# Altium footprint library Switches.PcbLib: 69 footprints (part 3 of 5)
Each footprint in its own frame and in the unit in brackets; x right, y up, seen from the top. Pads: shape width x height; smd on the part's side, far side on the other; paste and mask are expansions set on the pad; w line width, h text height; cw(c..) or ccw(c..) is an arc to the next point about the centre after c.
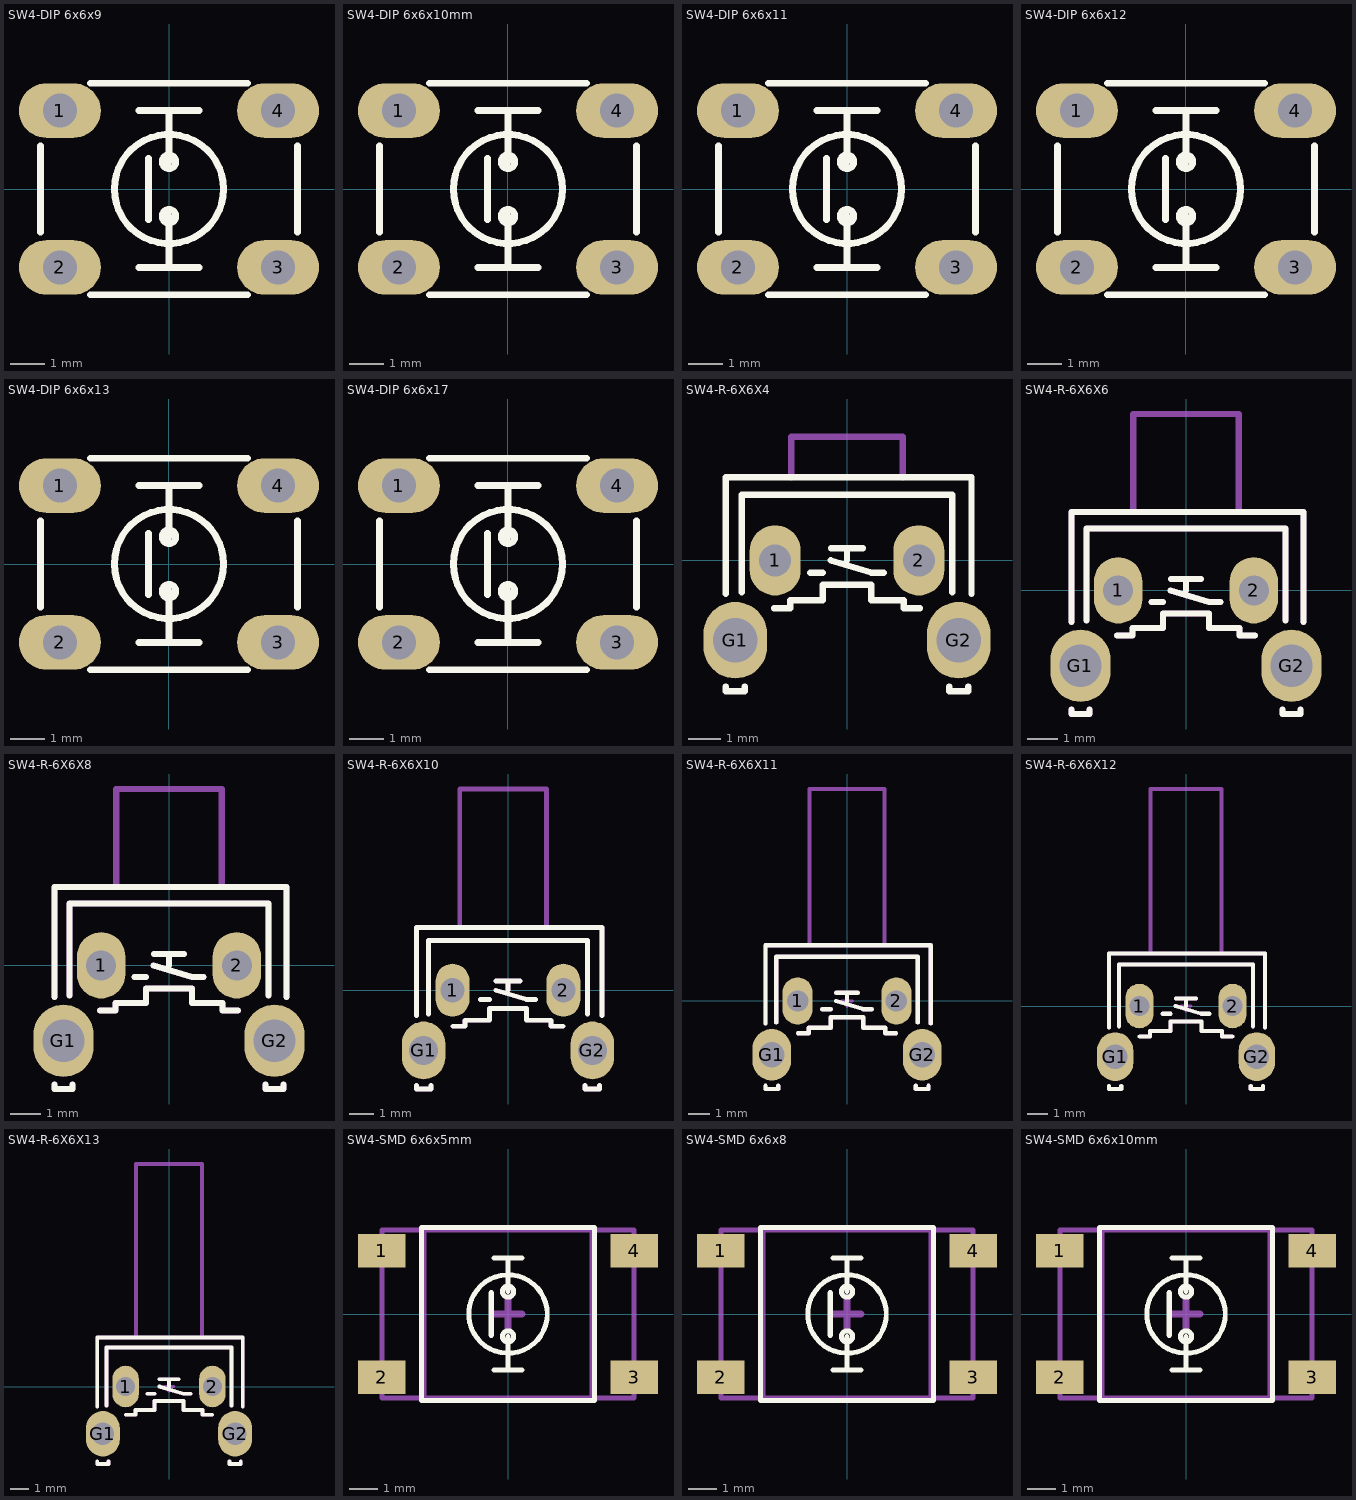
[diagram p2: the footprints below, top view; thin cyan lines are the x and y axes]

## SW4-DIP 6x6x9 [mm] "SW button 4pin, 250 x250 mil"
pads (4):
  oval 2.4x1.6 hole 1 mask+0.1: 1(-3.2,2.3) 2(-3.2,-2.3) 3(3.2,-2.3) 4(3.2,2.3)
Top Overlay:
  circle w0.2: c0,0 r1.6
  circle w0.2: c0,0.8 r0.2
  circle w0.2: c0,-0.8 r0.2
  lines w0.2: -3.772,-1.27 -3.772,1.27 ; -2.3,-3.1 2.3,-3.1 ; -2.3,3.1 2.3,3.1 ; -0.889,-2.3 0.889,-2.3 ; -0.889,2.3 0.889,2.3 ; -0.6,-0.9 -0.6,0.9 ; 0,-2.3 0,-0.8 ; 0,0.8 0,2.3 ; 3.771,-1.27 3.771,1.27
Top Designator:
  text ".Designator" at -3.71,-0.344 h1.52
3D body "button_hole_6x6x9.5.stp": height 9.6, standoff -3.4, extent -3.863,-3 3.863,3

## SW4-DIP 6x6x10mm [mm] "SW button 4pin, 250 x250 mil"
height 2.54
pads (4):
  oval 2.4x1.6 hole 1 mask+0.1: 1(-3.2,2.3) 2(-3.2,-2.3) 3(3.2,-2.3) 4(3.2,2.3)
Top Overlay:
  circle w0.2: c0,0 r1.6
  circle w0.2: c0,0.8 r0.2
  circle w0.2: c0,-0.8 r0.2
  lines w0.2: -3.772,-1.27 -3.772,1.27 ; -2.3,-3.1 2.3,-3.1 ; -2.3,3.1 2.3,3.1 ; -0.889,-2.3 0.889,-2.3 ; -0.889,2.3 0.889,2.3 ; -0.6,-0.9 -0.6,0.9 ; 0,-2.3 0,-0.8 ; 0,0.8 0,2.3 ; 3.771,-1.27 3.771,1.27
Top Designator:
  text ".Designator" at -3.71,-0.344 h1.52
3D body "SW3dPS-Panasonic-EVQPA-Pushbutton.STEP": height 9.5, standoff -3.5, extent -4.106,-3 4.106,3

## SW4-DIP 6x6x11 [mm] "SW button 4pin, 250 x250 mil"
pads (4):
  oval 2.4x1.6 hole 1 mask+0.1: 1(-3.2,2.3) 2(-3.2,-2.3) 3(3.2,-2.3) 4(3.2,2.3)
Top Overlay:
  circle w0.2: c0,0 r1.6
  circle w0.2: c0,0.8 r0.2
  circle w0.2: c0,-0.8 r0.2
  lines w0.2: -3.772,-1.27 -3.772,1.27 ; -2.3,-3.1 2.3,-3.1 ; -2.3,3.1 2.3,3.1 ; -0.889,-2.3 0.889,-2.3 ; -0.889,2.3 0.889,2.3 ; -0.6,-0.9 -0.6,0.9 ; 0,-2.3 0,-0.8 ; 0,0.8 0,2.3 ; 3.771,-1.27 3.771,1.27
Top Designator:
  text ".Designator" at -3.71,-0.344 h1.52
3D body "TS6-THT_H-11.0.step": height 11, standoff -3.5, extent -3.949,-3 3.949,3

## SW4-DIP 6x6x12 [mm] "SW button 4pin, 250 x250 mil"
height 2.54
pads (4):
  oval 2.4x1.6 hole 1 mask+0.1: 1(-3.2,2.3) 2(-3.2,-2.3) 3(3.2,-2.3) 4(3.2,2.3)
Top Overlay:
  circle w0.2: c0,0 r1.6
  circle w0.2: c0,0.8 r0.2
  circle w0.2: c0,-0.8 r0.2
  lines w0.2: -3.772,-1.27 -3.772,1.27 ; -2.3,-3.1 2.3,-3.1 ; -2.3,3.1 2.3,3.1 ; -0.889,-2.3 0.889,-2.3 ; -0.889,2.3 0.889,2.3 ; -0.6,-0.9 -0.6,0.9 ; 0,-2.3 0,-0.8 ; 0,0.8 0,2.3 ; 3.771,-1.27 3.771,1.27
Top Designator:
  text ".Designator" at -3.71,-0.344 h1.52
3D body "SW3dPS-Panasonic-EVQPA-Pushbutton.STEP": height 9.5, standoff -3.5, extent -4.106,-3 4.106,3
3D body: height 12, standoff 0.51, extent -1.6,-1.6 1.6,1.6

## SW4-DIP 6x6x13 [mm] "SW button 4pin, 250 x250 mil"
height 2.54
pads (4):
  oval 2.4x1.6 hole 1 mask+0.1: 1(-3.2,2.3) 2(-3.2,-2.3) 3(3.2,-2.3) 4(3.2,2.3)
Top Overlay:
  circle w0.2: c0,0 r1.6
  circle w0.2: c0,0.8 r0.2
  circle w0.2: c0,-0.8 r0.2
  lines w0.2: -3.772,-1.27 -3.772,1.27 ; -2.3,-3.1 2.3,-3.1 ; -2.3,3.1 2.3,3.1 ; -0.889,-2.3 0.889,-2.3 ; -0.889,2.3 0.889,2.3 ; -0.6,-0.9 -0.6,0.9 ; 0,-2.3 0,-0.8 ; 0,0.8 0,2.3 ; 3.771,-1.27 3.771,1.27
Top Designator:
  text ".Designator" at -3.71,-0.344 h1.52
3D body "TS6-THT_H-13.0.step": height 13, standoff -3.5, extent -3.949,-3 3.949,3

## SW4-DIP 6x6x17 [mm] "SW button 4pin, 250 x250 mil"
height 2.54
pads (4):
  oval 2.4x1.6 hole 1 mask+0.1: 1(-3.2,2.3) 2(-3.2,-2.3) 3(3.2,-2.3) 4(3.2,2.3)
Top Overlay:
  circle w0.2: c0,0 r1.6
  circle w0.2: c0,0.8 r0.2
  circle w0.2: c0,-0.8 r0.2
  lines w0.2: -3.772,-1.27 -3.772,1.27 ; -2.3,-3.1 2.3,-3.1 ; -2.3,3.1 2.3,3.1 ; -0.889,-2.3 0.889,-2.3 ; -0.889,2.3 0.889,2.3 ; -0.6,-0.9 -0.6,0.9 ; 0,-2.3 0,-0.8 ; 0,0.8 0,2.3 ; 3.771,-1.27 3.771,1.27
Top Designator:
  text ".Designator" at -3.71,-0.344 h1.52
3D body "button_hole_6x6x17.0.stp": height 17, standoff -3.5, extent -3.863,-3 3.863,3

## SW4-R-6X6X4 [mm] "SWITCH, PUSHBUTTON, THD, SPST, 6X6X3.85 mm; 1,000,000 cycles ; 0.98N Force, SKHHLMA010"
height 7.4
pads (4):
  oval 1.6x2.2 hole 1 mask+0.1: 1(-2.25,0) 2(2.25,0)
  oval 2x2.4 hole 1.4 mask+0.1: G1(-3.5,-2.5) G2(3.5,-2.5)
Top Overlay:
  lines w0.2: -3.8,-3.95 -3.8,-4.1 -3.2,-4.1 -3.2,-3.95 ; -3.8,-1.05 -3.8,2.6 3.9,2.6 3.9,-1.05 ; -3.3,-1 -3.3,2.057 -0.635,2.057 0.635,2.057 3.3,2.057 3.3,-1 ; -2.286,-1.499 -1.778,-1.499 -1.778,-1.245 -0.762,-1.245 -0.762,-0.762 0.762,-0.762 0.762,-1.245 1.778,-1.245 1.778,-1.499 2.286,-1.499 ; -1.15,-0.381 -0.762,-0.381 ; -0.508,0 0.762,-0.381 1.15,-0.381 ; -0.5,0.381 0.5,0.381 ; 0,0 0,0.381 ; 3.2,-3.95 3.2,-4.1 3.8,-4.1 3.8,-3.95
Top Designator:
  text ".Designator" at -3.71,-0.469 h1.52
Top Component Outline:
  lines w0.2: -1.75,2.6 -1.75,3.875 1.75,3.875 1.75,2.6
3D body "SKHHLM.STEP": height 7.43, standoff -3.47, extent -4.249,-4.042 4.249,3.858

## SW4-R-6X6X6 [mm] "SWITCH, PUSHBUTTON, THD, SPST, 6X6X5.85mm; 1,000,000 cycles ; 0.98N Force, SKHHLUA010"
height 7.4
pads (4):
  oval 1.6x2.2 hole 1 mask+0.1: 1(-2.25,0) 2(2.25,0)
  oval 2x2.4 hole 1.4 mask+0.1: G1(-3.5,-2.5) G2(3.5,-2.5)
Top Overlay:
  lines w0.2: -3.8,-3.95 -3.8,-4.1 -3.2,-4.1 -3.2,-3.95 ; -3.8,-1.05 -3.8,2.6 3.9,2.6 3.9,-1.05 ; -3.3,-1 -3.3,2.057 -0.635,2.057 0.635,2.057 3.3,2.057 3.3,-1 ; -2.286,-1.499 -1.778,-1.499 -1.778,-1.245 -0.762,-1.245 -0.762,-0.762 0.762,-0.762 0.762,-1.245 1.778,-1.245 1.778,-1.499 2.286,-1.499 ; -1.15,-0.381 -0.762,-0.381 ; -0.508,0 0.762,-0.381 1.15,-0.381 ; -0.5,0.381 0.5,0.381 ; 0,0 0,0.381 ; 3.2,-3.95 3.2,-4.1 3.8,-4.1 3.8,-3.95
Top Designator:
  text ".Designator" at -3.71,0.527 h1.52
Top Component Outline:
  lines w0.2: -3.8,-3.95 -3.8,-4.1 -3.2,-4.1 -3.2,-3.95 ; -3.8,-1.05 -3.8,2.6 3.9,2.6 3.9,-1.05 ; -3.3,-1 -3.3,2.057 -0.635,2.057 0.635,2.057 3.3,2.057 3.3,-1 ; -2.286,-1.499 -1.778,-1.499 -1.778,-1.245 -0.762,-1.245 -0.762,-0.762 0.762,-0.762 0.762,-1.245 1.778,-1.245 1.778,-1.499 2.286,-1.499 ; -1.75,2.6 -1.75,5.85 1.75,5.85 1.75,2.6 ; -1.15,-0.381 -0.762,-0.381 ; -0.508,0 0.762,-0.381 1.15,-0.381 ; -0.5,0.381 0.5,0.381 ; 0,0 0,0.381 ; 3.2,-3.95 3.2,-4.1 3.8,-4.1 3.8,-3.95
3D body "SKHHLU.STEP": height 7.43, standoff -3.47, extent -4.249,-4.042 4.249,5.858

## SW4-R-6X6X8 [mm] "SWITCH, PUSHBUTTON, THD, SPST, 6X6X8mm; 1,000,000 cycles ; 0.98N Force, SKHHLUA010"
height 7.4
pads (4):
  oval 1.6x2.2 hole 1 mask+0.1: 1(-2.25,0) 2(2.25,0)
  oval 2x2.4 hole 1.4 mask+0.1: G1(-3.5,-2.5) G2(3.5,-2.5)
Top Overlay:
  lines w0.2: -3.8,-3.95 -3.8,-4.1 -3.2,-4.1 -3.2,-3.95 ; -3.8,-1.05 -3.8,2.6 3.9,2.6 3.9,-1.05 ; -3.3,-1 -3.3,2.057 -0.635,2.057 0.635,2.057 3.3,2.057 3.3,-1 ; -2.286,-1.499 -1.778,-1.499 -1.778,-1.245 -0.762,-1.245 -0.762,-0.762 0.762,-0.762 0.762,-1.245 1.778,-1.245 1.778,-1.499 2.286,-1.499 ; -1.15,-0.381 -0.762,-0.381 ; -0.508,0 0.762,-0.381 1.15,-0.381 ; -0.5,0.381 0.5,0.381 ; 0,0 0,0.381 ; 3.2,-3.95 3.2,-4.1 3.8,-4.1 3.8,-3.95
Top Designator:
  text ".Designator" at -3.71,0.527 h1.52
Top Component Outline:
  lines w0.2: -3.8,-3.95 -3.8,-4.1 -3.2,-4.1 -3.2,-3.95 ; -3.8,-1.05 -3.8,2.6 3.9,2.6 3.9,-1.05 ; -3.3,-1 -3.3,2.057 -0.635,2.057 0.635,2.057 3.3,2.057 3.3,-1 ; -2.286,-1.499 -1.778,-1.499 -1.778,-1.245 -0.762,-1.245 -0.762,-0.762 0.762,-0.762 0.762,-1.245 1.778,-1.245 1.778,-1.499 2.286,-1.499 ; -1.75,2.6 -1.75,5.85 1.75,5.85 1.75,2.6 ; -1.15,-0.381 -0.762,-0.381 ; -0.508,0 0.762,-0.381 1.15,-0.381 ; -0.5,0.381 0.5,0.381 ; 0,0 0,0.381 ; 3.2,-3.95 3.2,-4.1 3.8,-4.1 3.8,-3.95
3D body "6x6x8.STEP": height 7, standoff -4, extent -3.7,-4.15 3.7,6.35

## SW4-R-6X6X10 [mm] "SWITCH, PUSHBUTTON, THD, SPST, 6X6mm, RIGHT ANGLE"
height 4
pads (4):
  oval 1.4x2.2 hole 1 mask+0.1: 1(-2.3,0) 2(2.3,0)
  oval 1.8x2.4 hole 1.2 mask+0.1: G1(-3.5,-2.5) G2(3.5,-2.5)
Top Overlay:
  lines w0.2: -3.8,-3.95 -3.8,-4.1 -3.2,-4.1 -3.2,-3.95 ; -3.8,-1.05 -3.8,2.6 3.9,2.6 3.9,-1.05 ; -3.3,-1 -3.3,2.057 -0.635,2.057 0.635,2.057 3.3,2.057 3.3,-1 ; -2.286,-1.499 -1.778,-1.499 -1.778,-1.245 -0.762,-1.245 -0.762,-0.762 0.762,-0.762 0.762,-1.245 1.778,-1.245 1.778,-1.499 2.286,-1.499 ; -1.15,-0.381 -0.762,-0.381 ; -0.508,0 0.762,-0.381 1.15,-0.381 ; -0.5,0.381 0.5,0.381 ; 0,0 0,0.381 ; 3.2,-3.95 3.2,-4.1 3.8,-4.1 3.8,-3.95
Top Designator:
  text ".Designator" at -3.71,-2.844 h1.52
Top Component Outline:
  lines w0.2: -3.8,-3.95 -3.8,-4.1 -3.2,-4.1 -3.2,-3.95 ; -3.8,-1.05 -3.8,2.6 3.9,2.6 3.9,-1.05 ; -3.3,-1 -3.3,2.057 -0.635,2.057 0.635,2.057 3.3,2.057 3.3,-1 ; -2.286,-1.499 -1.778,-1.499 -1.778,-1.245 -0.762,-1.245 -0.762,-0.762 0.762,-0.762 0.762,-1.245 1.778,-1.245 1.778,-1.499 2.286,-1.499 ; -2,2.6 -2,8.35 1.6,8.35 1.6,2.6 ; -1.15,-0.381 -0.762,-0.381 ; -0.508,0 0.762,-0.381 1.15,-0.381 ; -0.5,0.381 0.5,0.381 ; 0,0 0,0.381 ; 3.2,-3.95 3.2,-4.1 3.8,-4.1 3.8,-3.95
3D body "User Library-SWITCH, TACTILE, RIGHT ANGLE, 12VDC, 50MA, 8_35MM ACTUATOR, WEALTH METAL TC-0240Z.step": height 7, standoff -4, extent -3.7,-4.15 3.7,8.35

## SW4-R-6X6X11 [mm] "SWITCH, PUSHBUTTON, THD, SPST, 6X6mm, RIGHT ANGLE"
height 4
pads (4):
  oval 1.4x2.2 hole 1 mask+0.1: 1(-2.3,0) 2(2.3,0)
  oval 1.8x2.4 hole 1.2 mask+0.1: G1(-3.5,-2.5) G2(3.5,-2.5)
Top Overlay:
  lines w0.2: -3.8,-3.95 -3.8,-4.1 -3.2,-4.1 -3.2,-3.95 ; -3.8,-1.05 -3.8,2.6 3.9,2.6 3.9,-1.05 ; -3.3,-1 -3.3,2.057 -0.635,2.057 0.635,2.057 3.3,2.057 3.3,-1 ; -2.286,-1.499 -1.778,-1.499 -1.778,-1.245 -0.762,-1.245 -0.762,-0.762 0.762,-0.762 0.762,-1.245 1.778,-1.245 1.778,-1.499 2.286,-1.499 ; -1.15,-0.381 -0.762,-0.381 ; -0.508,0 0.762,-0.381 1.15,-0.381 ; -0.5,0.381 0.5,0.381 ; 0,0 0,0.381 ; 3.2,-3.95 3.2,-4.1 3.8,-4.1 3.8,-3.95
Top Designator:
  text ".Designator" at -3.71,-3.094 h1.52
Top Component Center:
  lines w0.15: -0.25,0 0.25,0 ; 0,-0.25 0,0.25
Top Component Outline:
  lines w0.2: -3.8,-3.95 -3.8,-4.1 -3.2,-4.1 -3.2,-3.95 ; -3.8,-1.05 -3.8,2.6 3.9,2.6 3.9,-1.05 ; -3.3,-1 -3.3,2.057 -0.635,2.057 0.635,2.057 3.3,2.057 3.3,-1 ; -2.286,-1.499 -1.778,-1.499 -1.778,-1.245 -0.762,-1.245 -0.762,-0.762 0.762,-0.762 0.762,-1.245 1.778,-1.245 1.778,-1.499 2.286,-1.499 ; -1.75,2.6 -1.75,9.875 1.75,9.875 1.75,2.6 ; -1.15,-0.381 -0.762,-0.381 ; -0.508,0 0.762,-0.381 1.15,-0.381 ; -0.5,0.381 0.5,0.381 ; 0,0 0,0.381 ; 3.2,-3.95 3.2,-4.1 3.8,-4.1 3.8,-3.95
3D body "TSW DIP-6x6x11_V.STEP": height 7.47, standoff -3.4, extent -4.184,-4 4.183,9.85

## SW4-R-6X6X12 [mm] "SWITCH, PUSHBUTTON, THD, SPST, 6X6mm, RIGHT ANGLE"
height 4
pads (4):
  oval 1.4x2.2 hole 1 mask+0.1: 1(-2.3,0) 2(2.3,0)
  oval 1.8x2.4 hole 1.2 mask+0.1: G1(-3.5,-2.5) G2(3.5,-2.5)
Top Overlay:
  lines w0.2: -3.8,-3.95 -3.8,-4.1 -3.2,-4.1 -3.2,-3.95 ; -3.8,-1.05 -3.8,2.6 3.9,2.6 3.9,-1.05 ; -3.3,-1 -3.3,2.057 -0.635,2.057 0.635,2.057 3.3,2.057 3.3,-1 ; -2.286,-1.499 -1.778,-1.499 -1.778,-1.245 -0.762,-1.245 -0.762,-0.762 0.762,-0.762 0.762,-1.245 1.778,-1.245 1.778,-1.499 2.286,-1.499 ; -1.15,-0.381 -0.762,-0.381 ; -0.508,0 0.762,-0.381 1.15,-0.381 ; -0.5,0.381 0.5,0.381 ; 0,0 0,0.381 ; 3.2,-3.95 3.2,-4.1 3.8,-4.1 3.8,-3.95
Top Designator:
  text ".Designator" at -3.71,-3.094 h1.52
Top Component Center:
  lines w0.15: -0.25,0 0.25,0 ; 0,-0.25 0,0.25
Top Component Outline:
  lines w0.2: -3.8,-3.95 -3.8,-4.1 -3.2,-4.1 -3.2,-3.95 ; -3.8,-1.05 -3.8,2.6 3.9,2.6 3.9,-1.05 ; -3.3,-1 -3.3,2.057 -0.635,2.057 0.635,2.057 3.3,2.057 3.3,-1 ; -2.286,-1.499 -1.778,-1.499 -1.778,-1.245 -0.762,-1.245 -0.762,-0.762 0.762,-0.762 0.762,-1.245 1.778,-1.245 1.778,-1.499 2.286,-1.499 ; -1.75,2.6 -1.75,10.725 1.75,10.725 1.75,2.6 ; -1.15,-0.381 -0.762,-0.381 ; -0.508,0 0.762,-0.381 1.15,-0.381 ; -0.5,0.381 0.5,0.381 ; 0,0 0,0.381 ; 3.2,-3.95 3.2,-4.1 3.8,-4.1 3.8,-3.95
3D body "TSW DIP-6x6x12_V.STEP": height 7.47, standoff -3.4, extent -4.184,-4.127 4.183,10.723

## SW4-R-6X6X13 [mm] "SWITCH, PUSHBUTTON, THD, SPST, 6X6mm, RIGHT ANGLE"
height 4
pads (4):
  oval 1.4x2.2 hole 1 mask+0.1: 1(-2.3,0) 2(2.3,0)
  oval 1.8x2.4 hole 1.2 mask+0.1: G1(-3.5,-2.5) G2(3.5,-2.5)
Top Overlay:
  lines w0.2: -3.8,-3.95 -3.8,-4.1 -3.2,-4.1 -3.2,-3.95 ; -3.8,-1.05 -3.8,2.6 3.9,2.6 3.9,-1.05 ; -3.3,-1 -3.3,2.057 -0.635,2.057 0.635,2.057 3.3,2.057 3.3,-1 ; -2.286,-1.499 -1.778,-1.499 -1.778,-1.245 -0.762,-1.245 -0.762,-0.762 0.762,-0.762 0.762,-1.245 1.778,-1.245 1.778,-1.499 2.286,-1.499 ; -1.15,-0.381 -0.762,-0.381 ; -0.508,0 0.762,-0.381 1.15,-0.381 ; -0.5,0.381 0.5,0.381 ; 0,0 0,0.381 ; 3.2,-3.95 3.2,-4.1 3.8,-4.1 3.8,-3.95
Top Designator:
  text ".Designator" at -3.71,-3.094 h1.52
Top Component Center:
  lines w0.15: -0.25,0 0.25,0 ; 0,-0.25 0,0.25
Top Component Outline:
  lines w0.2: -3.8,-3.95 -3.8,-4.1 -3.2,-4.1 -3.2,-3.95 ; -3.8,-1.05 -3.8,2.6 3.9,2.6 3.9,-1.05 ; -3.3,-1 -3.3,2.057 -0.635,2.057 0.635,2.057 3.3,2.057 3.3,-1 ; -2.286,-1.499 -1.778,-1.499 -1.778,-1.245 -0.762,-1.245 -0.762,-0.762 0.762,-0.762 0.762,-1.245 1.778,-1.245 1.778,-1.499 2.286,-1.499 ; -1.75,2.6 -1.75,11.775 1.75,11.775 1.75,2.6 ; -1.15,-0.381 -0.762,-0.381 ; -0.508,0 0.762,-0.381 1.15,-0.381 ; -0.5,0.381 0.5,0.381 ; 0,0 0,0.381 ; 3.2,-3.95 3.2,-4.1 3.8,-4.1 3.8,-3.95
3D body "TS6-THT-RA_H-13.0.step": height 7, standoff -3.5, extent -4.2,-4 4.2,11.75

## SW4-SMD 6x6x5mm [mm] "Switch SMD type"
pads (4):
  rect 1.7x1.2 smd: 1(-4.5,2.25) 2(-4.5,-2.25) 3(4.5,-2.25) 4(4.5,2.25)
Top Overlay:
  circle w0.178: c0,0.8 r0.2
  circle w0.178: c0,-0.8 r0.2
  circle w0.178: c0,0 r1.4
  lines w0.178: -0.5,-2 0.5,-2 ; -0.5,2 0.5,2 ; 0,-2 0,-0.8 ; 0,0.8 0,2 ; -3.089,-3.089 -3.089,3.089 3.089,3.089 3.089,-3.089 -3.089,-3.089
  lines w0.2: -0.6,-0.75 -0.6,0.75
Top 3D Body:
  lines w0.178: -4.5,-3 4.5,-3 4.5,3 -4.5,3 -4.5,-3
Top Designator:
  text ".Designator" at -3.71,-0.344 h1.52
Mechanical 15:
  lines w0.178: -3,-3 3,-3 3,3 -3,3 -3,-3
  lines w0.254: -0.5,0 0.5,0 ; 0,-0.5 0,0.5
3D body "Switch_TE_Connectivity_1571563-4_eec.STEP": height 5.38, standoff 0, extent -5,-3 5,3

## SW4-SMD 6x6x8 [mm] "Switch SMD type"
pads (4):
  rect 1.7x1.2 smd: 1(-4.5,2.25) 2(-4.5,-2.25) 3(4.5,-2.25) 4(4.5,2.25)
Top Overlay:
  circle w0.178: c0,0 r1.4
  circle w0.178: c0,-0.8 r0.2
  circle w0.178: c0,0.8 r0.2
  lines w0.178: -0.5,-2 0.5,-2 ; -0.5,2 0.5,2 ; 0,-2 0,-0.8 ; 0,0.8 0,2 ; -3.089,-3.089 3.089,-3.089 3.089,3.089 -3.089,3.089 -3.089,-3.089
  lines w0.2: -0.6,-0.75 -0.6,0.75
Top 3D Body:
  lines w0.178: -4.5,-3 -4.5,3 4.5,3 4.5,-3 -4.5,-3
Top Designator:
  text ".Designator" at -3.71,-0.344 h1.52
Mechanical 15:
  lines w0.178: -3,-3 -3,3 3,3 3,-3 -3,-3
  lines w0.254: -0.5,0 0.5,0 ; 0,-0.5 0,0.5
3D body "TS6-SMT_H-8.0.step": height 8, standoff 0, extent -4,-3 4,3

## SW4-SMD 6x6x10mm [mm] "Switch SMD type"
pads (4):
  rect 1.7x1.2 smd: 1(-4.5,2.25) 2(-4.5,-2.25) 3(4.5,-2.25) 4(4.5,2.25)
Top Overlay:
  circle w0.178: c0,0.8 r0.2
  circle w0.178: c0,-0.8 r0.2
  circle w0.178: c0,0 r1.4
  lines w0.178: -0.5,-2 0.5,-2 ; -0.5,2 0.5,2 ; 0,-2 0,-0.8 ; 0,0.8 0,2 ; -3.089,-3.089 -3.089,3.089 3.089,3.089 3.089,-3.089 -3.089,-3.089
  lines w0.2: -0.6,-0.75 -0.6,0.75
Top 3D Body:
  lines w0.178: -4.5,-3 4.5,-3 4.5,3 -4.5,3 -4.5,-3
Top Designator:
  text ".Designator" at -3.71,-0.344 h1.52
Mechanical 15:
  lines w0.178: -3,-3 3,-3 3,3 -3,3 -3,-3
  lines w0.254: -0.5,0 0.5,0 ; 0,-0.5 0,0.5
3D body "Tactal Switch - SMD (6mmx 6mmx 10mm) - Marked.stp": height 10, standoff 0, extent -4.508,-3.016 4.508,3.016